# Altium schematic symbol library ClayCounter.SchLib: 18 symbols
Pins are listed as number, name and electrical type; pins without a type are passive.

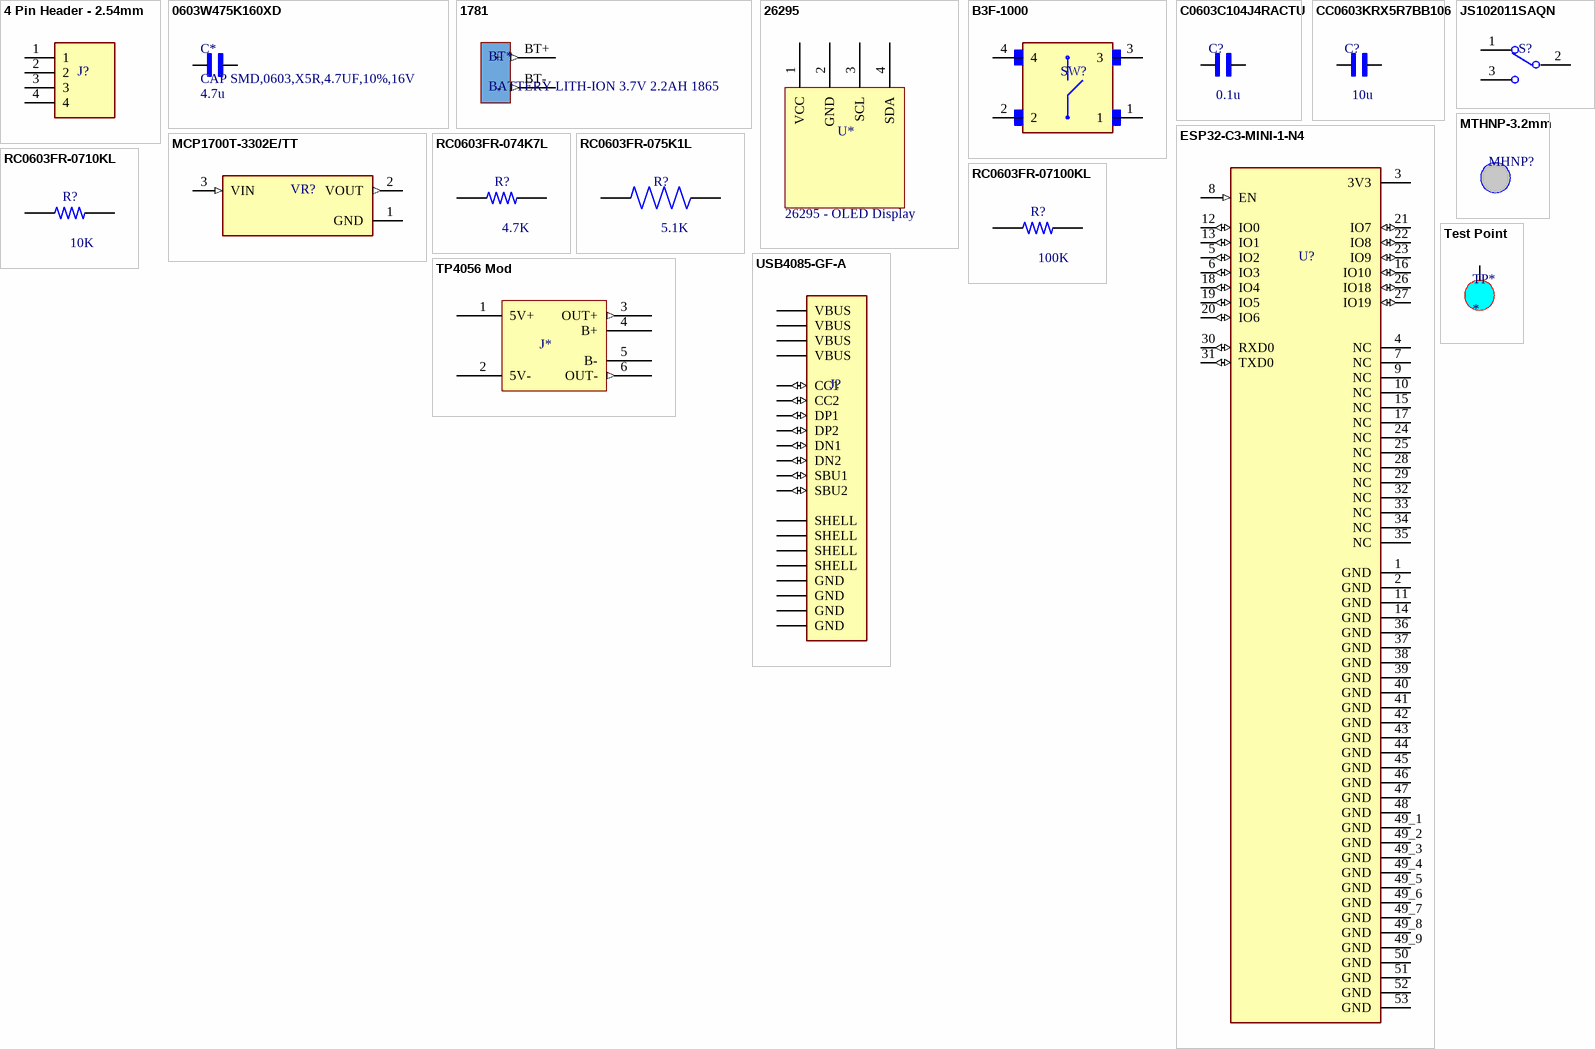
[diagram p0: symbols 4 Pin Header - 2.54mm to USB4085-GF-A]

## 4 Pin Header - 2.54mm
designator J?  (value not drawn)
MF: {'manufacturer': u'Samtec Inc.'}; MP: MTLW-104-X-X-S-X; Package: None; Price: None; Value: *; Availability: Unavailable
footprint 4 Pin Header TH - 2.54mm
pins: 1, 2, 3, 4

## 0603W475K160XD
designator C*, comment CAP SMD,0603,X5R,4.7UF,10%,16V  value 4.7u
4.7 µF ±10% 16V Ceramic Capacitor X5R 0603 (1608 Metric)
footprint CAPC1608X90 (For 0603 Capacitors)
pins: 1, 2

## 1781
designator BT*, comment BATTERY LITH-ION 3.7V 2.2AH 1865
18650 3.7 V Lithium-Ion Battery Rechargeable (Secondary) 2.2Ah; Supplier 1: DigiKey; Supplier Part Number 1: 1528-1836-ND
footprint 1781 Two Pad
pins: BT+ + (out), BT- - (out)

## 26295
designator U*, comment GRAPHIC DISPLAY OLED WHITE 1.3"  (value not drawn)
Non-Touch Graphic LCD Display Module Transmissive White OLED, Monochrome I2C 1.3" (33.02mm) 128 x 64
footprint 4 Pin Header TH - 2.54mm
pins: 1 VCC, 2 GND, 3 SCL, 4 SDA
text: 26295 - OLED Display

## B3F-1000
designator SW?, comment SWITCH TACTILE SPST-NO 0.05A 24V  (value not drawn)
Tactile Switch SPST-NO Top Actuated Through Hole; MF: Omron; MP: B3F-1000; Price: None; Check_prices: https://www.snapeda.com/parts/B3F-1000/Omron+Electronics+Inc-EMC+Div/view-part/?ref=eda; Purchase-URL: https://pricing.snapeda.com/search/part/B3F-1000/?ref=eda; Value: *; Package: None; Availability: In Stock; SnapEDA_Link: https://www.snapeda.com/parts/B3F-1000/Omron+Electronics+Inc-EMC+Div/view-part/?ref=snap; Supplier 1: DigiKey; Supplier Part Number 1: SW400-ND
footprint SW_B3F-1000
pins: 1, 2, 3, 4

## C0603C104J4RACTU
designator C?, comment value 0.1u  (hidden comment: CAP CER 0.1UF 16V X7R 0603)
0.1 µF ±5% 16V Ceramic Capacitor X7R 0603 (1608 Metric); MF: KEMET; MP: C0603C104J4RACTU; SnapEDA_Link: https://www.snapeda.com/parts/C0603C104J4RACTU/KEMET/view-part/?ref=snap; Package: 603-2 KEMET; Check_prices: https://www.snapeda.com/parts/C0603C104J4RACTU/KEMET/view-part/?ref=eda; Supplier 1: DigiKey; Supplier Part Number 1: 399-C0603C104J4RACTUCT-ND
footprint CAPC1608X90 (For 0603 Pads)
pins: 1, 2

## CC0603KRX5R7BB106
designator C?, comment value 10u  (hidden comment: CAP CER 10UF 16V X5R 0603)
10 µF ±10% 16V Ceramic Capacitor X5R 0603 (1608 Metric); MF: KEMET; MP: C0603C104J4RACTU; SnapEDA_Link: https://www.snapeda.com/parts/C0603C104J4RACTU/KEMET/view-part/?ref=snap; Package: 603-2 KEMET; Check_prices: https://www.snapeda.com/parts/C0603C104J4RACTU/KEMET/view-part/?ref=eda; Supplier 1: DigiKey; Supplier Part Number 1: 311-3486-1-ND
footprint CAPC1608X90 (For 0603 Pads)
pins: 1, 2

## ESP32-C3-MINI-1-N4
designator U?, comment RF TXRX MOD BT WIFI PCB TH SMD  (value not drawn)
Bluetooth, WiFi 802.11b/g/n, Bluetooth v5.0 Transceiver Module 2.412GHz ~ 2.484GHz PCB Trace Surface Mount; MF: {'manufacturer': u'Espressif Systems'}; MP: ESP32-C3-MINI-1-N4; Package: None; Price: None; Value: *; Availability: Unavailable; Supplier 1: DigiKey; Supplier Part Number 1: 5407-ESP32-C3-MINI-1-N4CT-ND
footprint XCVR_ESP32-C3-MINI-1-N4
pins: 1 GND (power), 2 GND (power), 3 3V3 (power), 4 NC, 5 IO2 (io), 6 IO3 (io), 7 NC, 8 EN (in), 9 NC, 10 NC, 11 GND (power), 12 IO0 (io), 13 IO1 (io), 14 GND (power), 15 NC, 16 IO10 (io), 17 NC, 18 IO4 (io), 19 IO5 (io), 20 IO6 (io), 21 IO7 (io), 22 IO8 (io), 23 IO9 (io), 24 NC, 25 NC, 26 IO18 (io), 27 IO19 (io), 28 NC, 29 NC, 30 RXD0 (io), 31 TXD0 (io), 32 NC, 33 NC, 34 NC, 35 NC, 36 GND (power), 37 GND (power), 38 GND (power), 39 GND (power), 40 GND (power), 41 GND (power), 42 GND (power), 43 GND (power), 44 GND (power), 45 GND (power), 46 GND (power), 47 GND (power), 48 GND (power), 49_1 GND (power), 49_2 GND (power), 49_3 GND (power), 49_4 GND (power), 49_5 GND (power), 49_6 GND (power), 49_7 GND (power), 49_8 GND (power), 49_9 GND (power), 50 GND (power), 51 GND (power), 52 GND (power), 53 GND (power)

## JS102011SAQN
designator S?, comment SWITCH SLIDE SPDT 300MA 6V  (value not drawn)
Slide Switch SPDT Surface Mount, Right Angle; MP: JS102011SAQN; MF: C&K; Check_prices: https://www.snapeda.com/parts/JS102011SAQN/C%2526K/view-part/?ref=eda; Digi-Key_Part_Number: 401-1999-2-ND; Package: None; Value: *; SnapEDA_Link: https://www.snapeda.com/parts/JS102011SAQN/C%2526K/view-part/?ref=snap; Purchase-URL: https://pricing.snapeda.com/search/part/JS102011SAQN/?ref=eda
footprint SW_JS102011SAQN
pins: 1, 2, 3

## MCP1700T-3302E/TT
designator VR?, comment IC REG LINEAR 3.3V 250MA SOT23-3  (value not drawn)
Linear Voltage Regulator IC Positive Fixed 1 Output 250mA SOT-23-3; MF: Microchip; MP: MCP1700T-3302E/TT; SnapEDA_Link: https://www.snapeda.com/parts/MCP1700T-3302E/TT/Microchip/view-part/?ref=snap; Package: SOT-23 Microchip; Value: *; Check_prices: https://www.snapeda.com/parts/MCP1700T-3302E/TT/Microchip/view-part/?ref=eda; Supplier 1: DigiKey; Supplier Part Number 1: MCP1700T3302ETTCT-ND
footprint SOT95P237X112-3N (For: MCP1700T-3302E/TT)
pins: 1 GND (power), 2 VOUT (out), 3 VIN (in)

## MTHNP-3.2mm
designator MHNP?, comment Mounting Hole Non-Plated 3.2mm  (value not drawn)
footprint MTHNP-3.2mm (Mounting Hole Non-Plated 3.2mm Drill)

## RC0603FR-074K7L
designator R?, comment value 4.7K  (hidden comment: RES 4.7K OHM 1% 1/10W 0603)
4.7 kOhms ±1% 0.1W, 1/10W Chip Resistor 0603 (1608 Metric) Moisture Resistant Thick Film; MF: Yageo Corporation; MP: RC0603FR074K7L; SnapEDA_Link: https://www.snapeda.com/parts/RC0603FR074K7L/Yageo/view-part/?ref=snap; Package: 0603-2 YAGEO; Check_prices: https://www.snapeda.com/parts/RC0603FR074K7L/Yageo/view-part/?ref=eda; Supplier 1: DigiKey; Supplier Part Number 1: 311-4.70KHRCT-ND
footprint RESC1607X60N (For 0603 Resistors)
pins: 1, 2

## RC0603FR-075K1L
designator R?, comment value 5.1K  (hidden comment: RES 5.1K OHM 1% 1/10W 0603)
5.1 kOhms ±1% 0.1W, 1/10W Chip Resistor 0603 (1608 Metric) Moisture Resistant Thick Film; MF: Yageo; MP: RC0603FR-075K1L; SnapEDA_Link: https://www.snapeda.com/parts/RC0603FR-075K1L/Yageo/view-part/?ref=snap; Package: 0603 Yageo; Check_prices: https://www.snapeda.com/parts/RC0603FR-075K1L/Yageo/view-part/?ref=eda; Supplier 1: DigiKey; Supplier Part Number 1: 311-5.10KHRCT-ND
footprint RESC1607X60N (For 0603 Resistors)
pins: 1, 2

## RC0603FR-0710KL
designator R?, comment value 10K  (hidden comment: RES 10K OHM 1% 1/10W 0603)
10 kOhms ±1% 0.1W, 1/10W Chip Resistor 0603 (1608 Metric) Moisture Resistant Thick Film; MF: Yageo; MP: RC0603FR-0710KL; SnapEDA_Link: https://www.snapeda.com/parts/RC0603FR-0710KL/Yageo/view-part/?ref=snap; Package: 0603 Yageo; Check_prices: https://www.snapeda.com/parts/RC0603FR-0710KL/Yageo/view-part/?ref=eda; Supplier 1: DigiKey; Supplier Part Number 1: 311-10.0KHRCT-ND
footprint RESC1607X60N (For 0603 Resistors)
pins: 1, 2

## RC0603FR-07100KL
designator R?, comment value 100K  (hidden comment: RES 100K OHM 1% 1/10W 0603)
100 kOhms ±1% 0.1W, 1/10W Chip Resistor 0603 (1608 Metric) Moisture Resistant Thick Film; MF: Yageo; MP: RC0603FR-07100KL; SnapEDA_Link: https://www.snapeda.com/parts/RC0603FR-07100KL/Yageo/view-part/?ref=snap; Package: 0603 Yageo; Check_prices: https://www.snapeda.com/parts/RC0603FR-07100KL/Yageo/view-part/?ref=eda; Supplier 1: DigiKey; Supplier Part Number 1: 311-100KHRCT-ND
footprint RESC1607X60N (For 0603 Resistors)
pins: 1, 2

## Test Point
designator TP*
footprint TestPoint
pins: TP

## TP4056 Mod
designator J*, comment TP4056 Module for 18650 Li-Po Charging  (value not drawn)
HiLetgo TP4056 Type-c USB 5V 1A 18650 Lithium Battery Charger Module Charging Board with Dual Protection Functions
footprint TP4056 (Just the pads that'll connect wire from the module itself)
pins: 1 5V+ (power), 2 5V- (power), 3 OUT+ (out), 4 B+, 5 B-, 6 OUT- (out)

## USB4085-GF-A
designator J?, comment CONN RCPT USB2.0 TYPE C 16+8POS  (value not drawn)
USB-C (USB TYPE-C) USB 2.0 Receptacle Connector 24 (16+8 Dummy) Position Through Hole, Right Angle; MP: USB4085-GF-A; MF: Global Connector Technology; SnapEDA_Link: https://www.snapeda.com/parts/USB4085-GF-A/Global+Connector+Technology/view-part/?ref=snap; Package: None; Check_prices: https://www.snapeda.com/parts/USB4085-GF-A/Global+Connector+Technology/view-part/?ref=eda; Purchase-URL: https://pricing.snapeda.com/search/part/USB4085-GF-A/?ref=eda; Price: None; Value: *; Availability: In Stock; Supplier 1: DigiKey; Supplier Part Number 1: 2073-USB4085-GF-ACT-ND
footprint GCT_USB4085-GF-A_REVA4
pins: A1 GND (power), A4 VBUS (power), A5 CC1 (io), A6 DP1 (io), A7 DN1 (io), A8 SBU1 (io), A9 VBUS (power), A12 GND (power), B1 GND (power), B4 VBUS (power), B5 CC2 (io), B6 DP2 (io), B7 DN2 (io), B8 SBU2 (io), B9 VBUS (power), B12 GND (power), S1 SHELL, S2 SHELL, S3 SHELL, S4 SHELL